# Altium footprint library Connector Header 254 Right Angel.PcbLib: 49 footprints (part 3 of 4)
Each footprint in its own frame and in the unit in brackets; x right, y up, seen from the top. Pads: shape width x height; smd on the part's side, far side on the other; paste and mask are expansions set on the pad; w line width, h text height; cw(c..) or ccw(c..) is an arc to the next point about the centre after c.
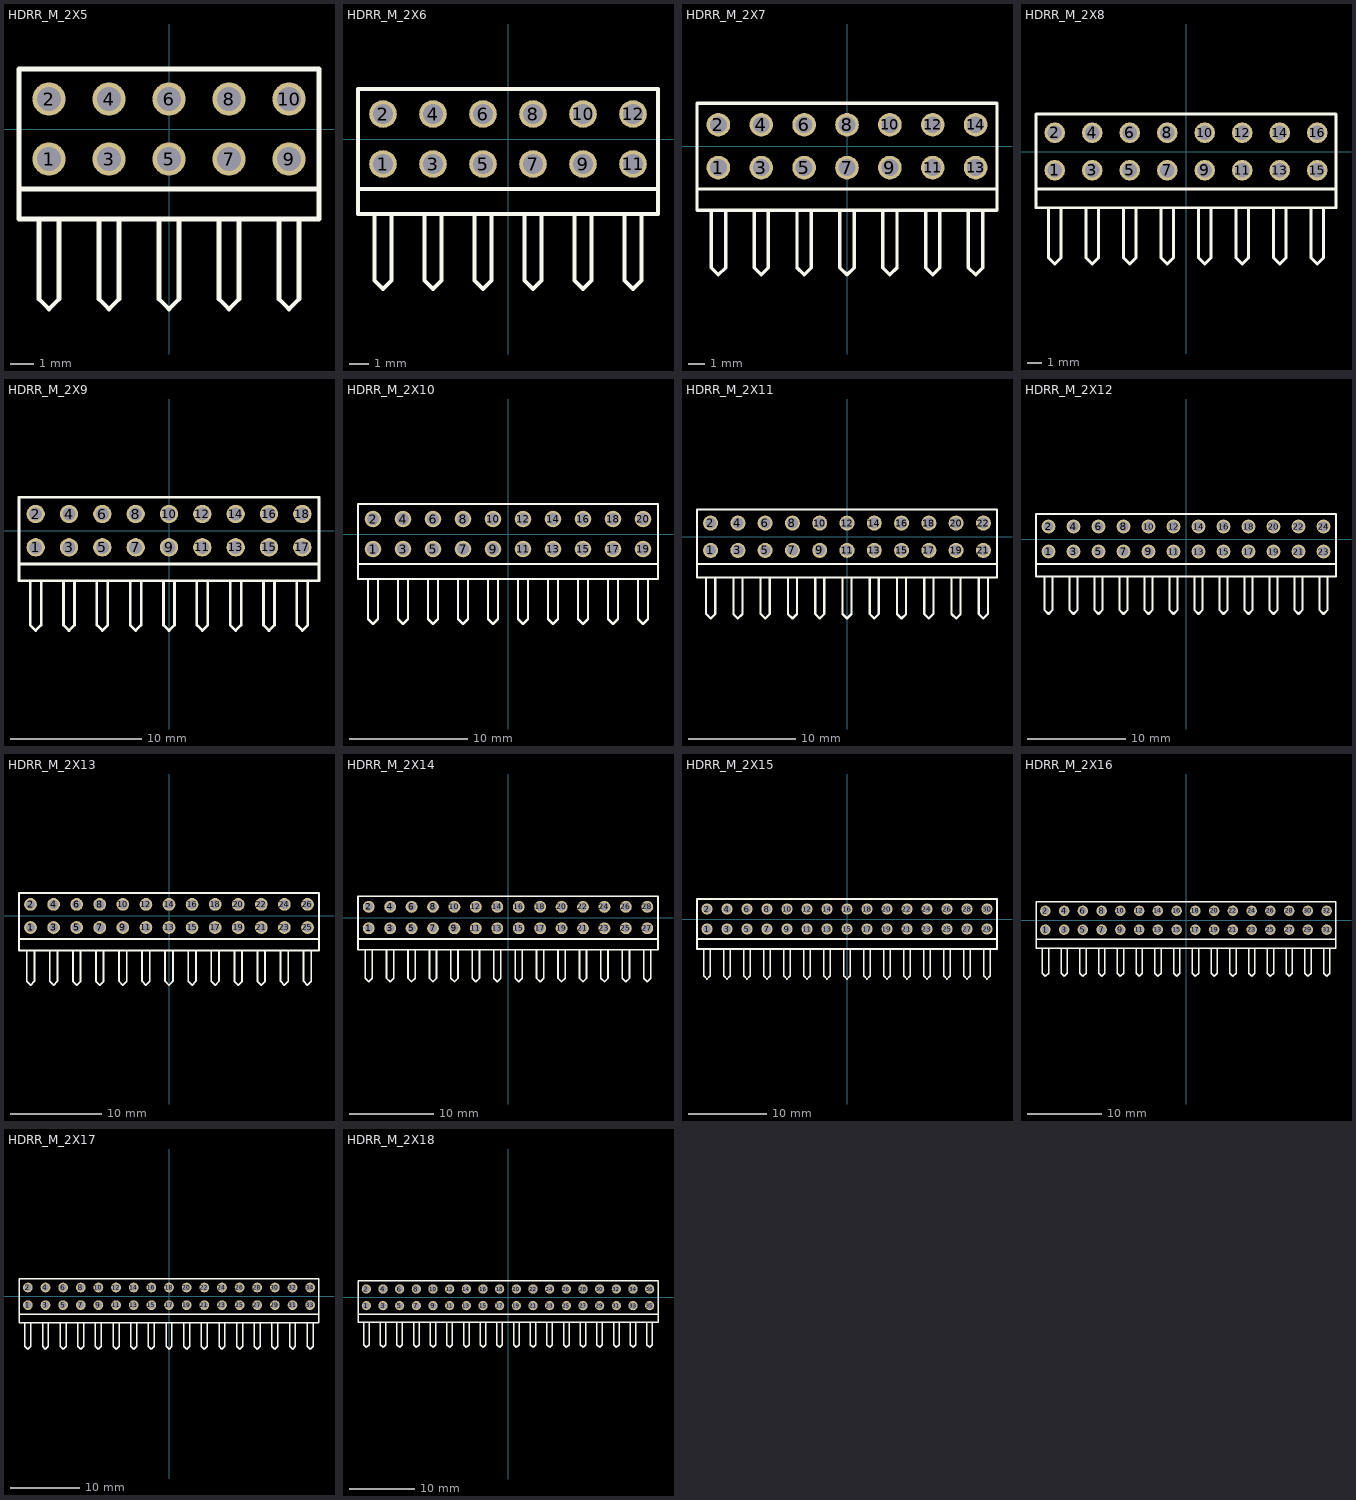
[diagram p2: the footprints below, top view; thin cyan lines are the x and y axes]

## HDRR_M_2X5 [mm] "Connector; Header; 5x2 Position"
height 7
pads (10):
  round 1.4 / inner round 1.4 / far side oval 1.4x2.2 hole 1: 1(-5.08,-1.27) 2(-5.08,1.27) 3(-2.54,-1.27) 4(-2.54,1.27) 5(0,-1.27) 6(0,1.27) 7(2.54,-1.27) 8(2.54,1.27) 9(5.08,-1.27) 10(5.08,1.27)
Top Overlay:
  lines w0.2: -5.503,-3.81 -5.503,-7.197 -5.08,-7.62 -4.657,-7.197 -4.657,-3.81 ; -2.963,-3.81 -2.963,-7.197 -2.54,-7.62 -2.117,-7.197 -2.117,-3.81 ; -0.423,-3.81 -0.423,-7.197 0,-7.62 0.423,-7.197 0.423,-3.81 ; 2.117,-3.81 2.117,-7.197 2.54,-7.62 2.963,-7.197 2.963,-3.81 ; 4.657,-3.81 4.657,-7.197 5.08,-7.62 5.503,-7.197 5.503,-3.81 ; -6.35,-2.54 -6.35,-3.81 6.35,-3.81 6.35,-2.54 ; -6.35,-2.54 6.35,-2.54 ; -6.35,-2.54 -6.35,2.54 6.35,2.54 6.35,-2.54
3D body "PLS-1R.step": height 5.45, standoff -3, extent -1.27,-8.62 1.27,0
3D body "PLS-1Rr.stp": height 7.99, standoff -3, extent -1.27,-8.62 1.27,2.54
3D body "PLS-1Rr.stp": height 7.99, standoff -3, extent -3.81,-8.62 -1.27,2.54
3D body "PLS-1R.step": height 5.45, standoff -3, extent -3.81,-8.62 -1.27,0
3D body "PLS-1R.step": height 5.45, standoff -3, extent 3.81,-8.62 6.35,0
3D body "PLS-1Rr.stp": height 7.99, standoff -3, extent 3.81,-8.62 6.35,2.54
3D body "PLS-1Rr.stp": height 7.99, standoff -3, extent 1.27,-8.62 3.81,2.54
3D body "PLS-1R.step": height 5.45, standoff -3, extent 1.27,-8.62 3.81,0
3D body "PLS-1R.step": height 5.45, standoff -3, extent -6.35,-8.62 -3.81,0
3D body "PLS-1Rr.stp": height 7.99, standoff -3, extent -6.35,-8.62 -3.81,2.54

## HDRR_M_2X6 [mm] "Connector; Header; 6x2 Position"
height 7
pads (12):
  round 1.4 / inner round 1.4 / far side oval 1.4x2.2 hole 1: 1(-6.35,-1.27) 2(-6.35,1.27) 3(-3.81,-1.27) 4(-3.81,1.27) 5(-1.27,-1.27) 6(-1.27,1.27) 7(1.27,-1.27) 8(1.27,1.27) 9(3.81,-1.27) 10(3.81,1.27) 11(6.35,-1.27) 12(6.35,1.27)
Top Overlay:
  lines w0.2: -6.773,-3.81 -6.773,-7.197 -6.35,-7.62 -5.927,-7.197 -5.927,-3.81 ; -4.233,-3.81 -4.233,-7.197 -3.81,-7.62 -3.387,-7.197 -3.387,-3.81 ; -1.693,-3.81 -1.693,-7.197 -1.27,-7.62 -0.847,-7.197 -0.847,-3.81 ; 0.847,-3.81 0.847,-7.197 1.27,-7.62 1.693,-7.197 1.693,-3.81 ; 3.387,-3.81 3.387,-7.197 3.81,-7.62 4.233,-7.197 4.233,-3.81 ; 5.927,-3.81 5.927,-7.197 6.35,-7.62 6.773,-7.197 6.773,-3.81 ; -7.62,-2.54 -7.62,2.54 7.62,2.54 7.62,-2.54 ; -7.62,-2.54 7.62,-2.54 ; -7.62,-2.54 -7.62,-3.81 7.62,-3.81 7.62,-2.54
3D body "PLS-1R.step": height 5.45, standoff -3, extent -5.08,-8.62 -2.54,0
3D body "PLS-1Rr.stp": height 7.99, standoff -3, extent -5.08,-8.62 -2.54,2.54
3D body "PLS-1Rr.stp": height 7.99, standoff -3, extent -7.62,-8.62 -5.08,2.54
3D body "PLS-1R.step": height 5.45, standoff -3, extent -7.62,-8.62 -5.08,0
3D body "PLS-1R.step": height 5.45, standoff -3, extent 0,-8.62 2.54,0
3D body "PLS-1Rr.stp": height 7.99, standoff -3, extent 0,-8.62 2.54,2.54
3D body "PLS-1Rr.stp": height 7.99, standoff -3, extent -2.54,-8.62 0,2.54
3D body "PLS-1R.step": height 5.45, standoff -3, extent -2.54,-8.62 0,0
3D body "PLS-1R.step": height 5.45, standoff -3, extent 5.08,-8.62 7.62,0
3D body "PLS-1Rr.stp": height 7.99, standoff -3, extent 5.08,-8.62 7.62,2.54
3D body "PLS-1Rr.stp": height 7.99, standoff -3, extent 2.54,-8.62 5.08,2.54
3D body "PLS-1R.step": height 5.45, standoff -3, extent 2.54,-8.62 5.08,0

## HDRR_M_2X7 [mm] "Connector; Header; 7x2 Position"
height 7
pads (14):
  round 1.4 / inner round 1.4 / far side oval 1.4x2.2 hole 1: 1(-7.62,-1.27) 2(-7.62,1.27) 3(-5.08,-1.27) 4(-5.08,1.27) 5(-2.54,-1.27) 6(-2.54,1.27) 7(0,-1.27) 8(0,1.27) 9(2.54,-1.27) 10(2.54,1.27) 11(5.08,-1.27) 12(5.08,1.27) 13(7.62,-1.27) 14(7.62,1.27)
Top Overlay:
  lines w0.2: -8.043,-3.81 -8.043,-7.197 -7.62,-7.62 -7.197,-7.197 -7.197,-3.81 ; -5.503,-3.81 -5.503,-7.197 -5.08,-7.62 -4.657,-7.197 -4.657,-3.81 ; -2.963,-3.81 -2.963,-7.197 -2.54,-7.62 -2.117,-7.197 -2.117,-3.81 ; -0.423,-3.81 -0.423,-7.197 0,-7.62 0.423,-7.197 0.423,-3.81 ; 2.117,-3.81 2.117,-7.197 2.54,-7.62 2.963,-7.197 2.963,-3.81 ; 4.657,-3.81 4.657,-7.197 5.08,-7.62 5.503,-7.197 5.503,-3.81 ; 7.197,-3.81 7.197,-7.197 7.62,-7.62 8.043,-7.197 8.043,-3.81 ; -8.89,-2.54 8.89,-2.54 ; -8.89,-2.54 -8.89,2.54 8.89,2.54 8.89,-2.54 ; -8.89,-2.54 -8.89,-3.81 8.89,-3.81 8.89,-2.54
3D body "PLS-1R.step": height 5.45, standoff -3, extent 3.81,-8.62 6.35,0
3D body "PLS-1Rr.stp": height 7.99, standoff -3, extent 3.81,-8.62 6.35,2.54
3D body "PLS-1Rr.stp": height 7.99, standoff -3, extent 1.27,-8.62 3.81,2.54
3D body "PLS-1R.step": height 5.45, standoff -3, extent 1.27,-8.62 3.81,0
3D body "PLS-1R.step": height 5.45, standoff -3, extent -1.27,-8.62 1.27,0
3D body "PLS-1Rr.stp": height 7.99, standoff -3, extent -1.27,-8.62 1.27,2.54
3D body "PLS-1Rr.stp": height 7.99, standoff -3, extent -3.81,-8.62 -1.27,2.54
3D body "PLS-1R.step": height 5.45, standoff -3, extent -3.81,-8.62 -1.27,0
3D body "PLS-1R.step": height 5.45, standoff -3, extent -6.35,-8.62 -3.81,0
3D body "PLS-1Rr.stp": height 7.99, standoff -3, extent -6.35,-8.62 -3.81,2.54
3D body "PLS-1Rr.stp": height 7.99, standoff -3, extent -8.89,-8.62 -6.35,2.54
3D body "PLS-1R.step": height 5.45, standoff -3, extent -8.89,-8.62 -6.35,0
3D body "PLS-1R.step": height 5.45, standoff -3, extent 6.35,-8.62 8.89,0
3D body "PLS-1Rr.stp": height 7.99, standoff -3, extent 6.35,-8.62 8.89,2.54

## HDRR_M_2X8 [mm] "Connector; Header; 8x2 Position"
height 7
pads (16):
  round 1.4 / inner round 1.4 / far side oval 1.4x2.2 hole 1: 1(-8.89,-1.27) 2(-8.89,1.27) 3(-6.35,-1.27) 4(-6.35,1.27) 5(-3.81,-1.27) 6(-3.81,1.27) 7(-1.27,-1.27) 8(-1.27,1.27) 9(1.27,-1.27) 10(1.27,1.27) 11(3.81,-1.27) 12(3.81,1.27) 13(6.35,-1.27) 14(6.35,1.27) 15(8.89,-1.27) 16(8.89,1.27)
Top Overlay:
  lines w0.2: -9.313,-3.81 -9.313,-7.197 -8.89,-7.62 -8.467,-7.197 -8.467,-3.81 ; -6.773,-3.81 -6.773,-7.197 -6.35,-7.62 -5.927,-7.197 -5.927,-3.81 ; -4.233,-3.81 -4.233,-7.197 -3.81,-7.62 -3.387,-7.197 -3.387,-3.81 ; -1.693,-3.81 -1.693,-7.197 -1.27,-7.62 -0.847,-7.197 -0.847,-3.81 ; 0.847,-3.81 0.847,-7.197 1.27,-7.62 1.693,-7.197 1.693,-3.81 ; 3.387,-3.81 3.387,-7.197 3.81,-7.62 4.233,-7.197 4.233,-3.81 ; 5.927,-3.81 5.927,-7.197 6.35,-7.62 6.773,-7.197 6.773,-3.81 ; 8.467,-3.81 8.467,-7.197 8.89,-7.62 9.313,-7.197 9.313,-3.81 ; -10.16,-2.54 -10.16,-3.81 10.16,-3.81 10.16,-2.54 ; -10.16,-2.54 -10.16,2.54 10.16,2.54 10.16,-2.54 ; -10.16,-2.54 10.16,-2.54
3D body "PLS-1R.step": height 5.45, standoff -3, extent -10.16,-8.62 -7.62,0
3D body "PLS-1Rr.stp": height 7.99, standoff -3, extent -10.16,-8.62 -7.62,2.54
3D body "PLS-1Rr.stp": height 7.99, standoff -3, extent -7.62,-8.62 -5.08,2.54
3D body "PLS-1R.step": height 5.45, standoff -3, extent -7.62,-8.62 -5.08,0
3D body "PLS-1R.step": height 5.45, standoff -3, extent -5.08,-8.62 -2.54,0
3D body "PLS-1Rr.stp": height 7.99, standoff -3, extent -5.08,-8.62 -2.54,2.54
3D body "PLS-1Rr.stp": height 7.99, standoff -3, extent -2.54,-8.62 0,2.54
3D body "PLS-1R.step": height 5.45, standoff -3, extent -2.54,-8.62 0,0
3D body "PLS-1R.step": height 5.45, standoff -3, extent 0,-8.62 2.54,0
3D body "PLS-1Rr.stp": height 7.99, standoff -3, extent 0,-8.62 2.54,2.54
3D body "PLS-1Rr.stp": height 7.99, standoff -3, extent 2.54,-8.62 5.08,2.54
3D body "PLS-1R.step": height 5.45, standoff -3, extent 2.54,-8.62 5.08,0
3D body "PLS-1R.step": height 5.45, standoff -3, extent 5.08,-8.62 7.62,0
3D body "PLS-1Rr.stp": height 7.99, standoff -3, extent 5.08,-8.62 7.62,2.54
3D body "PLS-1Rr.stp": height 7.99, standoff -3, extent 7.62,-8.62 10.16,2.54
3D body "PLS-1R.step": height 5.45, standoff -3, extent 7.62,-8.62 10.16,0

## HDRR_M_2X9 [mm] "Connector; Header; 9x2 Position"
height 7
pads (18):
  round 1.4 / inner round 1.4 / far side oval 1.4x2.2 hole 1: 1(-10.16,-1.27) 2(-10.16,1.27) 3(-7.62,-1.27) 4(-7.62,1.27) 5(-5.08,-1.27) 6(-5.08,1.27) 7(-2.54,-1.27) 8(-2.54,1.27) 9(0,-1.27) 10(0,1.27) 11(2.54,-1.27) 12(2.54,1.27) 13(5.08,-1.27) 14(5.08,1.27) 15(7.62,-1.27) 16(7.62,1.27) 17(10.16,-1.27) 18(10.16,1.27)
Top Overlay:
  lines w0.2: -10.583,-3.81 -10.583,-7.197 -10.16,-7.62 -9.737,-7.197 -9.737,-3.81 ; -8.043,-3.81 -8.043,-7.197 -7.62,-7.62 -7.197,-7.197 -7.197,-3.81 ; -5.503,-3.81 -5.503,-7.197 -5.08,-7.62 -4.657,-7.197 -4.657,-3.81 ; -2.963,-3.81 -2.963,-7.197 -2.54,-7.62 -2.117,-7.197 -2.117,-3.81 ; -0.423,-3.81 -0.423,-7.197 0,-7.62 0.423,-7.197 0.423,-3.81 ; 2.117,-3.81 2.117,-7.197 2.54,-7.62 2.963,-7.197 2.963,-3.81 ; 4.657,-3.81 4.657,-7.197 5.08,-7.62 5.503,-7.197 5.503,-3.81 ; 7.197,-3.81 7.197,-7.197 7.62,-7.62 8.043,-7.197 8.043,-3.81 ; 9.737,-3.81 9.737,-7.197 10.16,-7.62 10.583,-7.197 10.583,-3.81 ; -11.43,-2.54 -11.43,-3.81 11.43,-3.81 11.43,-2.54 ; -11.43,-2.54 11.43,-2.54 ; -11.43,-2.54 -11.43,2.54 11.43,2.54 11.43,-2.54
3D body "PLS-1R.step": height 5.45, standoff -3, extent 6.35,-8.62 8.89,0
3D body "PLS-1Rr.stp": height 7.99, standoff -3, extent 6.35,-8.62 8.89,2.54
3D body "PLS-1Rr.stp": height 7.99, standoff -3, extent 3.81,-8.62 6.35,2.54
3D body "PLS-1R.step": height 5.45, standoff -3, extent 3.81,-8.62 6.35,0
3D body "PLS-1R.step": height 5.45, standoff -3, extent 1.27,-8.62 3.81,0
3D body "PLS-1Rr.stp": height 7.99, standoff -3, extent 1.27,-8.62 3.81,2.54
3D body "PLS-1Rr.stp": height 7.99, standoff -3, extent -1.27,-8.62 1.27,2.54
3D body "PLS-1R.step": height 5.45, standoff -3, extent -1.27,-8.62 1.27,0
3D body "PLS-1R.step": height 5.45, standoff -3, extent -3.81,-8.62 -1.27,0
3D body "PLS-1Rr.stp": height 7.99, standoff -3, extent -3.81,-8.62 -1.27,2.54
3D body "PLS-1Rr.stp": height 7.99, standoff -3, extent -6.35,-8.62 -3.81,2.54
3D body "PLS-1R.step": height 5.45, standoff -3, extent -6.35,-8.62 -3.81,0
3D body "PLS-1R.step": height 5.45, standoff -3, extent -8.89,-8.62 -6.35,0
3D body "PLS-1Rr.stp": height 7.99, standoff -3, extent -8.89,-8.62 -6.35,2.54
3D body "PLS-1Rr.stp": height 7.99, standoff -3, extent -11.43,-8.62 -8.89,2.54
3D body "PLS-1R.step": height 5.45, standoff -3, extent -11.43,-8.62 -8.89,0
3D body "PLS-1R.step": height 5.45, standoff -3, extent 8.89,-8.62 11.43,0
3D body "PLS-1Rr.stp": height 7.99, standoff -3, extent 8.89,-8.62 11.43,2.54

## HDRR_M_2X10 [mm] "Connector; Header; 10x2 Position"
height 7
pads (20):
  round 1.4 / inner round 1.4 / far side oval 1.4x2.2 hole 1: 1(-11.43,-1.27) 2(-11.43,1.27) 3(-8.89,-1.27) 4(-8.89,1.27) 5(-6.35,-1.27) 6(-6.35,1.27) 7(-3.81,-1.27) 8(-3.81,1.27) 9(-1.27,-1.27) 10(-1.27,1.27) 11(1.27,-1.27) 12(1.27,1.27) 13(3.81,-1.27) 14(3.81,1.27) 15(6.35,-1.27) 16(6.35,1.27) 17(8.89,-1.27) 18(8.89,1.27) 19(11.43,-1.27) 20(11.43,1.27)
Top Overlay:
  lines w0.2: -11.853,-3.81 -11.853,-7.197 -11.43,-7.62 -11.007,-7.197 -11.007,-3.81 ; -9.313,-3.81 -9.313,-7.197 -8.89,-7.62 -8.467,-7.197 -8.467,-3.81 ; -6.773,-3.81 -6.773,-7.197 -6.35,-7.62 -5.927,-7.197 -5.927,-3.81 ; -4.233,-3.81 -4.233,-7.197 -3.81,-7.62 -3.387,-7.197 -3.387,-3.81 ; -1.693,-3.81 -1.693,-7.197 -1.27,-7.62 -0.847,-7.197 -0.847,-3.81 ; 0.847,-3.81 0.847,-7.197 1.27,-7.62 1.693,-7.197 1.693,-3.81 ; 3.387,-3.81 3.387,-7.197 3.81,-7.62 4.233,-7.197 4.233,-3.81 ; 5.927,-3.81 5.927,-7.197 6.35,-7.62 6.773,-7.197 6.773,-3.81 ; 8.467,-3.81 8.467,-7.197 8.89,-7.62 9.313,-7.197 9.313,-3.81 ; 11.007,-3.81 11.007,-7.197 11.43,-7.62 11.853,-7.197 11.853,-3.81 ; -12.7,-2.54 -12.7,-3.81 12.7,-3.81 12.7,-2.54 ; -12.7,-2.54 12.7,-2.54 ; -12.7,-2.54 -12.7,2.54 12.7,2.54 12.7,-2.54
3D body "PLS-1R.step": height 5.45, standoff -3, extent -12.7,-8.62 -10.16,0
3D body "PLS-1Rr.stp": height 7.99, standoff -3, extent -12.7,-8.62 -10.16,2.54
3D body "PLS-1Rr.stp": height 7.99, standoff -3, extent -10.16,-8.62 -7.62,2.54
3D body "PLS-1R.step": height 5.45, standoff -3, extent -10.16,-8.62 -7.62,0
3D body "PLS-1R.step": height 5.45, standoff -3, extent -7.62,-8.62 -5.08,0
3D body "PLS-1Rr.stp": height 7.99, standoff -3, extent -7.62,-8.62 -5.08,2.54
3D body "PLS-1Rr.stp": height 7.99, standoff -3, extent -5.08,-8.62 -2.54,2.54
3D body "PLS-1R.step": height 5.45, standoff -3, extent -5.08,-8.62 -2.54,0
3D body "PLS-1R.step": height 5.45, standoff -3, extent -2.54,-8.62 0,0
3D body "PLS-1Rr.stp": height 7.99, standoff -3, extent -2.54,-8.62 0,2.54
3D body "PLS-1Rr.stp": height 7.99, standoff -3, extent 0,-8.62 2.54,2.54
3D body "PLS-1R.step": height 5.45, standoff -3, extent 0,-8.62 2.54,0
3D body "PLS-1R.step": height 5.45, standoff -3, extent 2.54,-8.62 5.08,0
3D body "PLS-1Rr.stp": height 7.99, standoff -3, extent 2.54,-8.62 5.08,2.54
3D body "PLS-1Rr.stp": height 7.99, standoff -3, extent 5.08,-8.62 7.62,2.54
3D body "PLS-1R.step": height 5.45, standoff -3, extent 5.08,-8.62 7.62,0
3D body "PLS-1R.step": height 5.45, standoff -3, extent 7.62,-8.62 10.16,0
3D body "PLS-1Rr.stp": height 7.99, standoff -3, extent 7.62,-8.62 10.16,2.54
3D body "PLS-1Rr.stp": height 7.99, standoff -3, extent 10.16,-8.62 12.7,2.54
3D body "PLS-1R.step": height 5.45, standoff -3, extent 10.16,-8.62 12.7,0

## HDRR_M_2X11 [mm] "Connector; Header; 11x2 Position"
height 7
pads (22):
  round 1.4 / inner round 1.4 / far side oval 1.4x2.2 hole 1: 1(-12.7,-1.27) 2(-12.7,1.27) 3(-10.16,-1.27) 4(-10.16,1.27) 5(-7.62,-1.27) 6(-7.62,1.27) 7(-5.08,-1.27) 8(-5.08,1.27) 9(-2.54,-1.27) 10(-2.54,1.27) 11(0,-1.27) 12(0,1.27) 13(2.54,-1.27) 14(2.54,1.27) 15(5.08,-1.27) 16(5.08,1.27) 17(7.62,-1.27) 18(7.62,1.27) 19(10.16,-1.27) 20(10.16,1.27) 21(12.7,-1.27) 22(12.7,1.27)
Top Overlay:
  lines w0.2: -13.123,-3.81 -13.123,-7.197 -12.7,-7.62 -12.277,-7.197 -12.277,-3.81 ; -10.583,-3.81 -10.583,-7.197 -10.16,-7.62 -9.737,-7.197 -9.737,-3.81 ; -8.043,-3.81 -8.043,-7.197 -7.62,-7.62 -7.197,-7.197 -7.197,-3.81 ; -5.503,-3.81 -5.503,-7.197 -5.08,-7.62 -4.657,-7.197 -4.657,-3.81 ; -2.963,-3.81 -2.963,-7.197 -2.54,-7.62 -2.117,-7.197 -2.117,-3.81 ; -0.423,-3.81 -0.423,-7.197 0,-7.62 0.423,-7.197 0.423,-3.81 ; 2.117,-3.81 2.117,-7.197 2.54,-7.62 2.963,-7.197 2.963,-3.81 ; 4.657,-3.81 4.657,-7.197 5.08,-7.62 5.503,-7.197 5.503,-3.81 ; 7.197,-3.81 7.197,-7.197 7.62,-7.62 8.043,-7.197 8.043,-3.81 ; 9.737,-3.81 9.737,-7.197 10.16,-7.62 10.583,-7.197 10.583,-3.81 ; 12.277,-3.81 12.277,-7.197 12.7,-7.62 13.123,-7.197 13.123,-3.81 ; -13.97,-2.54 13.97,-2.54 ; -13.97,-2.54 -13.97,2.54 13.97,2.54 13.97,-2.54 ; -13.97,-2.54 -13.97,-3.81 13.97,-3.81 13.97,-2.54
3D body "PLS-1Rr.stp": height 7.99, standoff -3, extent 11.43,-8.62 13.97,2.54
3D body "PLS-1R.step": height 5.45, standoff -3, extent 11.43,-8.62 13.97,0
3D body "PLS-1R.step": height 5.45, standoff -3, extent -13.97,-8.62 -11.43,0
3D body "PLS-1Rr.stp": height 7.99, standoff -3, extent -13.97,-8.62 -11.43,2.54
3D body "PLS-1Rr.stp": height 7.99, standoff -3, extent -11.43,-8.62 -8.89,2.54
3D body "PLS-1R.step": height 5.45, standoff -3, extent -11.43,-8.62 -8.89,0
3D body "PLS-1R.step": height 5.45, standoff -3, extent -8.89,-8.62 -6.35,0
3D body "PLS-1Rr.stp": height 7.99, standoff -3, extent -8.89,-8.62 -6.35,2.54
3D body "PLS-1Rr.stp": height 7.99, standoff -3, extent -6.35,-8.62 -3.81,2.54
3D body "PLS-1R.step": height 5.45, standoff -3, extent -6.35,-8.62 -3.81,0
3D body "PLS-1R.step": height 5.45, standoff -3, extent -3.81,-8.62 -1.27,0
3D body "PLS-1Rr.stp": height 7.99, standoff -3, extent -3.81,-8.62 -1.27,2.54
3D body "PLS-1Rr.stp": height 7.99, standoff -3, extent -1.27,-8.62 1.27,2.54
3D body "PLS-1R.step": height 5.45, standoff -3, extent -1.27,-8.62 1.27,0
3D body "PLS-1R.step": height 5.45, standoff -3, extent 1.27,-8.62 3.81,0
3D body "PLS-1Rr.stp": height 7.99, standoff -3, extent 1.27,-8.62 3.81,2.54
3D body "PLS-1Rr.stp": height 7.99, standoff -3, extent 3.81,-8.62 6.35,2.54
3D body "PLS-1R.step": height 5.45, standoff -3, extent 3.81,-8.62 6.35,0
3D body "PLS-1R.step": height 5.45, standoff -3, extent 6.35,-8.62 8.89,0
3D body "PLS-1Rr.stp": height 7.99, standoff -3, extent 6.35,-8.62 8.89,2.54
3D body "PLS-1Rr.stp": height 7.99, standoff -3, extent 8.89,-8.62 11.43,2.54
3D body "PLS-1R.step": height 5.45, standoff -3, extent 8.89,-8.62 11.43,0

## HDRR_M_2X12 [mm] "Connector; Header; 12x2 Position"
height 7
pads (24):
  round 1.4 / inner round 1.4 / far side oval 1.4x2.2 hole 1: 1(-13.97,-1.27) 2(-13.97,1.27) 3(-11.43,-1.27) 4(-11.43,1.27) 5(-8.89,-1.27) 6(-8.89,1.27) 7(-6.35,-1.27) 8(-6.35,1.27) 9(-3.81,-1.27) 10(-3.81,1.27) 11(-1.27,-1.27) 12(-1.27,1.27) 13(1.27,-1.27) 14(1.27,1.27) 15(3.81,-1.27) 16(3.81,1.27) 17(6.35,-1.27) 18(6.35,1.27) 19(8.89,-1.27) 20(8.89,1.27) 21(11.43,-1.27) 22(11.43,1.27) 23(13.97,-1.27) 24(13.97,1.27)
Top Overlay:
  lines w0.2: -14.393,-3.81 -14.393,-7.197 -13.97,-7.62 -13.547,-7.197 -13.547,-3.81 ; -11.853,-3.81 -11.853,-7.197 -11.43,-7.62 -11.007,-7.197 -11.007,-3.81 ; -9.313,-3.81 -9.313,-7.197 -8.89,-7.62 -8.467,-7.197 -8.467,-3.81 ; -6.773,-3.81 -6.773,-7.197 -6.35,-7.62 -5.927,-7.197 -5.927,-3.81 ; -4.233,-3.81 -4.233,-7.197 -3.81,-7.62 -3.387,-7.197 -3.387,-3.81 ; -1.693,-3.81 -1.693,-7.197 -1.27,-7.62 -0.847,-7.197 -0.847,-3.81 ; 0.847,-3.81 0.847,-7.197 1.27,-7.62 1.693,-7.197 1.693,-3.81 ; 3.387,-3.81 3.387,-7.197 3.81,-7.62 4.233,-7.197 4.233,-3.81 ; 5.927,-3.81 5.927,-7.197 6.35,-7.62 6.773,-7.197 6.773,-3.81 ; 8.467,-3.81 8.467,-7.197 8.89,-7.62 9.313,-7.197 9.313,-3.81 ; 11.007,-3.81 11.007,-7.197 11.43,-7.62 11.853,-7.197 11.853,-3.81 ; 13.547,-3.81 13.547,-7.197 13.97,-7.62 14.393,-7.197 14.393,-3.81 ; -15.24,-2.54 -15.24,-3.81 15.24,-3.81 15.24,-2.54 ; -15.24,-2.54 -15.24,2.54 15.24,2.54 15.24,-2.54 ; -15.24,-2.54 15.24,-2.54
3D body "PLS-1R.step": height 5.45, standoff -3, extent 12.7,-8.62 15.24,0
3D body "PLS-1Rr.stp": height 7.99, standoff -3, extent 12.7,-8.62 15.24,2.54
3D body "PLS-1Rr.stp": height 7.99, standoff -3, extent 10.16,-8.62 12.7,2.54
3D body "PLS-1R.step": height 5.45, standoff -3, extent 10.16,-8.62 12.7,0
3D body "PLS-1R.step": height 5.45, standoff -3, extent 7.62,-8.62 10.16,0
3D body "PLS-1Rr.stp": height 7.99, standoff -3, extent 7.62,-8.62 10.16,2.54
3D body "PLS-1Rr.stp": height 7.99, standoff -3, extent 5.08,-8.62 7.62,2.54
3D body "PLS-1R.step": height 5.45, standoff -3, extent 5.08,-8.62 7.62,0
3D body "PLS-1R.step": height 5.45, standoff -3, extent 2.54,-8.62 5.08,0
3D body "PLS-1Rr.stp": height 7.99, standoff -3, extent 2.54,-8.62 5.08,2.54
3D body "PLS-1Rr.stp": height 7.99, standoff -3, extent 0,-8.62 2.54,2.54
3D body "PLS-1R.step": height 5.45, standoff -3, extent 0,-8.62 2.54,0
3D body "PLS-1R.step": height 5.45, standoff -3, extent -2.54,-8.62 0,0
3D body "PLS-1Rr.stp": height 7.99, standoff -3, extent -2.54,-8.62 0,2.54
3D body "PLS-1Rr.stp": height 7.99, standoff -3, extent -5.08,-8.62 -2.54,2.54
3D body "PLS-1R.step": height 5.45, standoff -3, extent -5.08,-8.62 -2.54,0
3D body "PLS-1R.step": height 5.45, standoff -3, extent -7.62,-8.62 -5.08,0
3D body "PLS-1Rr.stp": height 7.99, standoff -3, extent -7.62,-8.62 -5.08,2.54
3D body "PLS-1Rr.stp": height 7.99, standoff -3, extent -10.16,-8.62 -7.62,2.54
3D body "PLS-1R.step": height 5.45, standoff -3, extent -10.16,-8.62 -7.62,0
3D body "PLS-1R.step": height 5.45, standoff -3, extent -12.7,-8.62 -10.16,0
3D body "PLS-1Rr.stp": height 7.99, standoff -3, extent -12.7,-8.62 -10.16,2.54
3D body "PLS-1Rr.stp": height 7.99, standoff -3, extent -15.24,-8.62 -12.7,2.54
3D body "PLS-1R.step": height 5.45, standoff -3, extent -15.24,-8.62 -12.7,0

## HDRR_M_2X13 [mm] "Connector; Header; 13x2 Position"
height 7
pads (26):
  round 1.4 / inner round 1.4 / far side oval 1.4x2.2 hole 1: 1(-15.24,-1.27) 2(-15.24,1.27) 3(-12.7,-1.27) 4(-12.7,1.27) 5(-10.16,-1.27) 6(-10.16,1.27) 7(-7.62,-1.27) 8(-7.62,1.27) 9(-5.08,-1.27) 10(-5.08,1.27) 11(-2.54,-1.27) 12(-2.54,1.27) 13(0,-1.27) 14(0,1.27) 15(2.54,-1.27) 16(2.54,1.27) 17(5.08,-1.27) 18(5.08,1.27) 19(7.62,-1.27) 20(7.62,1.27) 21(10.16,-1.27) 22(10.16,1.27) 23(12.7,-1.27) 24(12.7,1.27) 25(15.24,-1.27) 26(15.24,1.27)
Top Overlay:
  lines w0.2: -15.663,-3.81 -15.663,-7.197 -15.24,-7.62 -14.817,-7.197 -14.817,-3.81 ; -13.123,-3.81 -13.123,-7.197 -12.7,-7.62 -12.277,-7.197 -12.277,-3.81 ; -10.583,-3.81 -10.583,-7.197 -10.16,-7.62 -9.737,-7.197 -9.737,-3.81 ; -8.043,-3.81 -8.043,-7.197 -7.62,-7.62 -7.197,-7.197 -7.197,-3.81 ; -5.503,-3.81 -5.503,-7.197 -5.08,-7.62 -4.657,-7.197 -4.657,-3.81 ; -2.963,-3.81 -2.963,-7.197 -2.54,-7.62 -2.117,-7.197 -2.117,-3.81 ; -0.423,-3.81 -0.423,-7.197 0,-7.62 0.423,-7.197 0.423,-3.81 ; 2.117,-3.81 2.117,-7.197 2.54,-7.62 2.963,-7.197 2.963,-3.81 ; 4.657,-3.81 4.657,-7.197 5.08,-7.62 5.503,-7.197 5.503,-3.81 ; 7.197,-3.81 7.197,-7.197 7.62,-7.62 8.043,-7.197 8.043,-3.81 ; 9.737,-3.81 9.737,-7.197 10.16,-7.62 10.583,-7.197 10.583,-3.81 ; 12.277,-3.81 12.277,-7.197 12.7,-7.62 13.123,-7.197 13.123,-3.81 ; 14.817,-3.81 14.817,-7.197 15.24,-7.62 15.663,-7.197 15.663,-3.81 ; -16.51,-2.54 -16.51,-3.81 16.51,-3.81 16.51,-2.54 ; -16.51,-2.54 -16.51,2.54 16.51,2.54 16.51,-2.54 ; -16.51,-2.54 16.51,-2.54
3D body "PLS-1R.step": height 5.45, standoff -3, extent 11.43,-8.62 13.97,0
3D body "PLS-1Rr.stp": height 7.99, standoff -3, extent 11.43,-8.62 13.97,2.54
3D body "PLS-1Rr.stp": height 7.99, standoff -3, extent 8.89,-8.62 11.43,2.54
3D body "PLS-1R.step": height 5.45, standoff -3, extent 8.89,-8.62 11.43,0
3D body "PLS-1R.step": height 5.45, standoff -3, extent 6.35,-8.62 8.89,0
3D body "PLS-1Rr.stp": height 7.99, standoff -3, extent 6.35,-8.62 8.89,2.54
3D body "PLS-1Rr.stp": height 7.99, standoff -3, extent 3.81,-8.62 6.35,2.54
3D body "PLS-1R.step": height 5.45, standoff -3, extent 3.81,-8.62 6.35,0
3D body "PLS-1R.step": height 5.45, standoff -3, extent 1.27,-8.62 3.81,0
3D body "PLS-1Rr.stp": height 7.99, standoff -3, extent 1.27,-8.62 3.81,2.54
3D body "PLS-1Rr.stp": height 7.99, standoff -3, extent -1.27,-8.62 1.27,2.54
3D body "PLS-1R.step": height 5.45, standoff -3, extent -1.27,-8.62 1.27,0
3D body "PLS-1R.step": height 5.45, standoff -3, extent -3.81,-8.62 -1.27,0
3D body "PLS-1Rr.stp": height 7.99, standoff -3, extent -3.81,-8.62 -1.27,2.54
3D body "PLS-1Rr.stp": height 7.99, standoff -3, extent -6.35,-8.62 -3.81,2.54
3D body "PLS-1R.step": height 5.45, standoff -3, extent -6.35,-8.62 -3.81,0
3D body "PLS-1R.step": height 5.45, standoff -3, extent -8.89,-8.62 -6.35,0
3D body "PLS-1Rr.stp": height 7.99, standoff -3, extent -8.89,-8.62 -6.35,2.54
3D body "PLS-1Rr.stp": height 7.99, standoff -3, extent -11.43,-8.62 -8.89,2.54
3D body "PLS-1R.step": height 5.45, standoff -3, extent -11.43,-8.62 -8.89,0
3D body "PLS-1R.step": height 5.45, standoff -3, extent -13.97,-8.62 -11.43,0
3D body "PLS-1Rr.stp": height 7.99, standoff -3, extent -13.97,-8.62 -11.43,2.54
3D body "PLS-1Rr.stp": height 7.99, standoff -3, extent -16.51,-8.62 -13.97,2.54
3D body "PLS-1R.step": height 5.45, standoff -3, extent -16.51,-8.62 -13.97,0
3D body "PLS-1R.step": height 5.45, standoff -3, extent 13.97,-8.62 16.51,0
3D body "PLS-1Rr.stp": height 7.99, standoff -3, extent 13.97,-8.62 16.51,2.54

## HDRR_M_2X14 [mm] "Connector; Header; 14x2 Position"
height 7
pads (28):
  round 1.4 / inner round 1.4 / far side oval 1.4x2.2 hole 1: 1(-16.51,-1.27) 2(-16.51,1.27) 3(-13.97,-1.27) 4(-13.97,1.27) 5(-11.43,-1.27) 6(-11.43,1.27) 7(-8.89,-1.27) 8(-8.89,1.27) 9(-6.35,-1.27) 10(-6.35,1.27) 11(-3.81,-1.27) 12(-3.81,1.27) 13(-1.27,-1.27) 14(-1.27,1.27) 15(1.27,-1.27) 16(1.27,1.27) 17(3.81,-1.27) 18(3.81,1.27) 19(6.35,-1.27) 20(6.35,1.27) 21(8.89,-1.27) 22(8.89,1.27) 23(11.43,-1.27) 24(11.43,1.27) 25(13.97,-1.27) 26(13.97,1.27) 27(16.51,-1.27) 28(16.51,1.27)
Top Overlay:
  lines w0.2: -16.933,-3.81 -16.933,-7.197 -16.51,-7.62 -16.087,-7.197 -16.087,-3.81 ; -14.393,-3.81 -14.393,-7.197 -13.97,-7.62 -13.547,-7.197 -13.547,-3.81 ; -11.853,-3.81 -11.853,-7.197 -11.43,-7.62 -11.007,-7.197 -11.007,-3.81 ; -9.313,-3.81 -9.313,-7.197 -8.89,-7.62 -8.467,-7.197 -8.467,-3.81 ; -6.773,-3.81 -6.773,-7.197 -6.35,-7.62 -5.927,-7.197 -5.927,-3.81 ; -4.233,-3.81 -4.233,-7.197 -3.81,-7.62 -3.387,-7.197 -3.387,-3.81 ; -1.693,-3.81 -1.693,-7.197 -1.27,-7.62 -0.847,-7.197 -0.847,-3.81 ; 0.847,-3.81 0.847,-7.197 1.27,-7.62 1.693,-7.197 1.693,-3.81 ; 3.387,-3.81 3.387,-7.197 3.81,-7.62 4.233,-7.197 4.233,-3.81 ; 5.927,-3.81 5.927,-7.197 6.35,-7.62 6.773,-7.197 6.773,-3.81 ; 8.467,-3.81 8.467,-7.197 8.89,-7.62 9.313,-7.197 9.313,-3.81 ; 11.007,-3.81 11.007,-7.197 11.43,-7.62 11.853,-7.197 11.853,-3.81 ; 13.547,-3.81 13.547,-7.197 13.97,-7.62 14.393,-7.197 14.393,-3.81 ; 16.087,-3.81 16.087,-7.197 16.51,-7.62 16.933,-7.197 16.933,-3.81 ; -17.78,-2.54 17.78,-2.54 ; -17.78,-2.54 -17.78,2.54 17.78,2.54 17.78,-2.54 ; -17.78,-2.54 -17.78,-3.81 17.78,-3.81 17.78,-2.54
3D body "PLS-1R.step": height 5.45, standoff -3, extent 15.24,-8.62 17.78,0
3D body "PLS-1Rr.stp": height 7.99, standoff -3, extent 15.24,-8.62 17.78,2.54
3D body "PLS-1Rr.stp": height 7.99, standoff -3, extent 12.7,-8.62 15.24,2.54
3D body "PLS-1R.step": height 5.45, standoff -3, extent 12.7,-8.62 15.24,0
3D body "PLS-1R.step": height 5.45, standoff -3, extent 10.16,-8.62 12.7,0
3D body "PLS-1Rr.stp": height 7.99, standoff -3, extent 10.16,-8.62 12.7,2.54
3D body "PLS-1Rr.stp": height 7.99, standoff -3, extent 7.62,-8.62 10.16,2.54
3D body "PLS-1R.step": height 5.45, standoff -3, extent 7.62,-8.62 10.16,0
3D body "PLS-1R.step": height 5.45, standoff -3, extent 5.08,-8.62 7.62,0
3D body "PLS-1Rr.stp": height 7.99, standoff -3, extent 5.08,-8.62 7.62,2.54
3D body "PLS-1Rr.stp": height 7.99, standoff -3, extent 2.54,-8.62 5.08,2.54
3D body "PLS-1R.step": height 5.45, standoff -3, extent 2.54,-8.62 5.08,0
3D body "PLS-1R.step": height 5.45, standoff -3, extent 0,-8.62 2.54,0
3D body "PLS-1Rr.stp": height 7.99, standoff -3, extent 0,-8.62 2.54,2.54
3D body "PLS-1Rr.stp": height 7.99, standoff -3, extent -2.54,-8.62 0,2.54
3D body "PLS-1R.step": height 5.45, standoff -3, extent -2.54,-8.62 0,0
3D body "PLS-1R.step": height 5.45, standoff -3, extent -5.08,-8.62 -2.54,0
3D body "PLS-1Rr.stp": height 7.99, standoff -3, extent -5.08,-8.62 -2.54,2.54
3D body "PLS-1Rr.stp": height 7.99, standoff -3, extent -7.62,-8.62 -5.08,2.54
3D body "PLS-1R.step": height 5.45, standoff -3, extent -7.62,-8.62 -5.08,0
3D body "PLS-1R.step": height 5.45, standoff -3, extent -10.16,-8.62 -7.62,0
3D body "PLS-1Rr.stp": height 7.99, standoff -3, extent -10.16,-8.62 -7.62,2.54
3D body "PLS-1Rr.stp": height 7.99, standoff -3, extent -12.7,-8.62 -10.16,2.54
3D body "PLS-1R.step": height 5.45, standoff -3, extent -12.7,-8.62 -10.16,0
3D body "PLS-1R.step": height 5.45, standoff -3, extent -15.24,-8.62 -12.7,0
3D body "PLS-1Rr.stp": height 7.99, standoff -3, extent -15.24,-8.62 -12.7,2.54
3D body "PLS-1Rr.stp": height 7.99, standoff -3, extent -17.78,-8.62 -15.24,2.54
3D body "PLS-1R.step": height 5.45, standoff -3, extent -17.78,-8.62 -15.24,0

## HDRR_M_2X15 [mm] "Connector; Header; 15x2 Position"
height 0.001
pads (30):
  round 1.4 / inner round 1.4 / far side oval 1.4x2.2 hole 1: 1(-17.78,-1.27) 2(-17.78,1.27) 3(-15.24,-1.27) 4(-15.24,1.27) 5(-12.7,-1.27) 6(-12.7,1.27) 7(-10.16,-1.27) 8(-10.16,1.27) 9(-7.62,-1.27) 10(-7.62,1.27) 11(-5.08,-1.27) 12(-5.08,1.27) 13(-2.54,-1.27) 14(-2.54,1.27) 15(0,-1.27) 16(0,1.27) 17(2.54,-1.27) 18(2.54,1.27) 19(5.08,-1.27) 20(5.08,1.27) 21(7.62,-1.27) 22(7.62,1.27) 23(10.16,-1.27) 24(10.16,1.27) 25(12.7,-1.27) 26(12.7,1.27) 27(15.24,-1.27) 28(15.24,1.27) 29(17.78,-1.27) 30(17.78,1.27)
Top Overlay:
  lines w0.2: -18.203,-3.81 -18.203,-7.197 -17.78,-7.62 -17.357,-7.197 -17.357,-3.81 ; -15.663,-3.81 -15.663,-7.197 -15.24,-7.62 -14.817,-7.197 -14.817,-3.81 ; -13.123,-3.81 -13.123,-7.197 -12.7,-7.62 -12.277,-7.197 -12.277,-3.81 ; -10.583,-3.81 -10.583,-7.197 -10.16,-7.62 -9.737,-7.197 -9.737,-3.81 ; -8.043,-3.81 -8.043,-7.197 -7.62,-7.62 -7.197,-7.197 -7.197,-3.81 ; -5.503,-3.81 -5.503,-7.197 -5.08,-7.62 -4.657,-7.197 -4.657,-3.81 ; -2.963,-3.81 -2.963,-7.197 -2.54,-7.62 -2.117,-7.197 -2.117,-3.81 ; -0.423,-3.81 -0.423,-7.197 0,-7.62 0.423,-7.197 0.423,-3.81 ; 2.117,-3.81 2.117,-7.197 2.54,-7.62 2.963,-7.197 2.963,-3.81 ; 4.657,-3.81 4.657,-7.197 5.08,-7.62 5.503,-7.197 5.503,-3.81 ; 7.197,-3.81 7.197,-7.197 7.62,-7.62 8.043,-7.197 8.043,-3.81 ; 9.737,-3.81 9.737,-7.197 10.16,-7.62 10.583,-7.197 10.583,-3.81 ; 12.277,-3.81 12.277,-7.197 12.7,-7.62 13.123,-7.197 13.123,-3.81 ; 14.817,-3.81 14.817,-7.197 15.24,-7.62 15.663,-7.197 15.663,-3.81 ; 17.357,-3.81 17.357,-7.197 17.78,-7.62 18.203,-7.197 18.203,-3.81 ; -19.05,-2.54 -19.05,-3.81 19.05,-3.81 19.05,-2.54 ; -19.05,-2.54 19.05,-2.54 ; -19.05,-2.54 -19.05,2.54 19.05,2.54 19.05,-2.54
3D body "PLS-1Rr.stp": height 7.99, standoff -3, extent 16.51,-8.62 19.05,2.54
3D body "PLS-1R.step": height 5.45, standoff -3, extent 16.51,-8.62 19.05,0
3D body "PLS-1R.step": height 5.45, standoff -3, extent -19.05,-8.62 -16.51,0
3D body "PLS-1Rr.stp": height 7.99, standoff -3, extent -19.05,-8.62 -16.51,2.54
3D body "PLS-1Rr.stp": height 7.99, standoff -3, extent -16.51,-8.62 -13.97,2.54
3D body "PLS-1R.step": height 5.45, standoff -3, extent -16.51,-8.62 -13.97,0
3D body "PLS-1R.step": height 5.45, standoff -3, extent -13.97,-8.62 -11.43,0
3D body "PLS-1Rr.stp": height 7.99, standoff -3, extent -13.97,-8.62 -11.43,2.54
3D body "PLS-1Rr.stp": height 7.99, standoff -3, extent -11.43,-8.62 -8.89,2.54
3D body "PLS-1R.step": height 5.45, standoff -3, extent -11.43,-8.62 -8.89,0
3D body "PLS-1R.step": height 5.45, standoff -3, extent -8.89,-8.62 -6.35,0
3D body "PLS-1Rr.stp": height 7.99, standoff -3, extent -8.89,-8.62 -6.35,2.54
3D body "PLS-1Rr.stp": height 7.99, standoff -3, extent -6.35,-8.62 -3.81,2.54
3D body "PLS-1R.step": height 5.45, standoff -3, extent -6.35,-8.62 -3.81,0
3D body "PLS-1R.step": height 5.45, standoff -3, extent -3.81,-8.62 -1.27,0
3D body "PLS-1Rr.stp": height 7.99, standoff -3, extent -3.81,-8.62 -1.27,2.54
3D body "PLS-1Rr.stp": height 7.99, standoff -3, extent -1.27,-8.62 1.27,2.54
3D body "PLS-1R.step": height 5.45, standoff -3, extent -1.27,-8.62 1.27,0
3D body "PLS-1R.step": height 5.45, standoff -3, extent 1.27,-8.62 3.81,0
3D body "PLS-1Rr.stp": height 7.99, standoff -3, extent 1.27,-8.62 3.81,2.54
3D body "PLS-1Rr.stp": height 7.99, standoff -3, extent 3.81,-8.62 6.35,2.54
3D body "PLS-1R.step": height 5.45, standoff -3, extent 3.81,-8.62 6.35,0
3D body "PLS-1R.step": height 5.45, standoff -3, extent 6.35,-8.62 8.89,0
3D body "PLS-1Rr.stp": height 7.99, standoff -3, extent 6.35,-8.62 8.89,2.54
3D body "PLS-1Rr.stp": height 7.99, standoff -3, extent 8.89,-8.62 11.43,2.54
3D body "PLS-1R.step": height 5.45, standoff -3, extent 8.89,-8.62 11.43,0
3D body "PLS-1R.step": height 5.45, standoff -3, extent 11.43,-8.62 13.97,0
3D body "PLS-1Rr.stp": height 7.99, standoff -3, extent 11.43,-8.62 13.97,2.54
3D body "PLS-1Rr.stp": height 7.99, standoff -3, extent 13.97,-8.62 16.51,2.54
3D body "PLS-1R.step": height 5.45, standoff -3, extent 13.97,-8.62 16.51,0

## HDRR_M_2X16 [mm] "Connector; Header; 16x2 Position"
height 7
pads (32):
  round 1.4 / inner round 1.4 / far side oval 1.4x2.2 hole 1: 1(-19.05,-1.27) 2(-19.05,1.27) 3(-16.51,-1.27) 4(-16.51,1.27) 5(-13.97,-1.27) 6(-13.97,1.27) 7(-11.43,-1.27) 8(-11.43,1.27) 9(-8.89,-1.27) 10(-8.89,1.27) 11(-6.35,-1.27) 12(-6.35,1.27) 13(-3.81,-1.27) 14(-3.81,1.27) 15(-1.27,-1.27) 16(-1.27,1.27) 17(1.27,-1.27) 18(1.27,1.27) 19(3.81,-1.27) 20(3.81,1.27) 21(6.35,-1.27) 22(6.35,1.27) 23(8.89,-1.27) 24(8.89,1.27) 25(11.43,-1.27) 26(11.43,1.27) 27(13.97,-1.27) 28(13.97,1.27) 29(16.51,-1.27) 30(16.51,1.27) 31(19.05,-1.27) 32(19.05,1.27)
Top Overlay:
  lines w0.2: -19.473,-3.81 -19.473,-7.197 -19.05,-7.62 -18.627,-7.197 -18.627,-3.81 ; -16.933,-3.81 -16.933,-7.197 -16.51,-7.62 -16.087,-7.197 -16.087,-3.81 ; -14.393,-3.81 -14.393,-7.197 -13.97,-7.62 -13.547,-7.197 -13.547,-3.81 ; -11.853,-3.81 -11.853,-7.197 -11.43,-7.62 -11.007,-7.197 -11.007,-3.81 ; -9.313,-3.81 -9.313,-7.197 -8.89,-7.62 -8.467,-7.197 -8.467,-3.81 ; -6.773,-3.81 -6.773,-7.197 -6.35,-7.62 -5.927,-7.197 -5.927,-3.81 ; -4.233,-3.81 -4.233,-7.197 -3.81,-7.62 -3.387,-7.197 -3.387,-3.81 ; -1.693,-3.81 -1.693,-7.197 -1.27,-7.62 -0.847,-7.197 -0.847,-3.81 ; 0.847,-3.81 0.847,-7.197 1.27,-7.62 1.693,-7.197 1.693,-3.81 ; 3.387,-3.81 3.387,-7.197 3.81,-7.62 4.233,-7.197 4.233,-3.81 ; 5.927,-3.81 5.927,-7.197 6.35,-7.62 6.773,-7.197 6.773,-3.81 ; 8.467,-3.81 8.467,-7.197 8.89,-7.62 9.313,-7.197 9.313,-3.81 ; 11.007,-3.81 11.007,-7.197 11.43,-7.62 11.853,-7.197 11.853,-3.81 ; 13.547,-3.81 13.547,-7.197 13.97,-7.62 14.393,-7.197 14.393,-3.81 ; 16.087,-3.81 16.087,-7.197 16.51,-7.62 16.933,-7.197 16.933,-3.81 ; 18.627,-3.81 18.627,-7.197 19.05,-7.62 19.473,-7.197 19.473,-3.81 ; -20.32,-2.54 -20.32,-3.81 20.32,-3.81 20.32,-2.54 ; -20.32,-2.54 20.32,-2.54 ; -20.32,-2.54 -20.32,2.54 20.32,2.54 20.32,-2.54
3D body "PLS-1R.step": height 5.45, standoff -3, extent -20.32,-8.62 -17.78,0
3D body "PLS-1Rr.stp": height 7.99, standoff -3, extent -20.32,-8.62 -17.78,2.54
3D body "PLS-1Rr.stp": height 7.99, standoff -3, extent -17.78,-8.62 -15.24,2.54
3D body "PLS-1R.step": height 5.45, standoff -3, extent -17.78,-8.62 -15.24,0
3D body "PLS-1R.step": height 5.45, standoff -3, extent -15.24,-8.62 -12.7,0
3D body "PLS-1Rr.stp": height 7.99, standoff -3, extent -15.24,-8.62 -12.7,2.54
3D body "PLS-1Rr.stp": height 7.99, standoff -3, extent -12.7,-8.62 -10.16,2.54
3D body "PLS-1R.step": height 5.45, standoff -3, extent -12.7,-8.62 -10.16,0
3D body "PLS-1R.step": height 5.45, standoff -3, extent -10.16,-8.62 -7.62,0
3D body "PLS-1Rr.stp": height 7.99, standoff -3, extent -10.16,-8.62 -7.62,2.54
3D body "PLS-1Rr.stp": height 7.99, standoff -3, extent -7.62,-8.62 -5.08,2.54
3D body "PLS-1R.step": height 5.45, standoff -3, extent -7.62,-8.62 -5.08,0
3D body "PLS-1R.step": height 5.45, standoff -3, extent -5.08,-8.62 -2.54,0
3D body "PLS-1Rr.stp": height 7.99, standoff -3, extent -5.08,-8.62 -2.54,2.54
3D body "PLS-1Rr.stp": height 7.99, standoff -3, extent -2.54,-8.62 0,2.54
3D body "PLS-1R.step": height 5.45, standoff -3, extent -2.54,-8.62 0,0
3D body "PLS-1R.step": height 5.45, standoff -3, extent 0,-8.62 2.54,0
3D body "PLS-1Rr.stp": height 7.99, standoff -3, extent 0,-8.62 2.54,2.54
3D body "PLS-1Rr.stp": height 7.99, standoff -3, extent 2.54,-8.62 5.08,2.54
3D body "PLS-1R.step": height 5.45, standoff -3, extent 2.54,-8.62 5.08,0
3D body "PLS-1R.step": height 5.45, standoff -3, extent 5.08,-8.62 7.62,0
3D body "PLS-1Rr.stp": height 7.99, standoff -3, extent 5.08,-8.62 7.62,2.54
3D body "PLS-1Rr.stp": height 7.99, standoff -3, extent 7.62,-8.62 10.16,2.54
3D body "PLS-1R.step": height 5.45, standoff -3, extent 7.62,-8.62 10.16,0
3D body "PLS-1R.step": height 5.45, standoff -3, extent 10.16,-8.62 12.7,0
3D body "PLS-1Rr.stp": height 7.99, standoff -3, extent 10.16,-8.62 12.7,2.54
3D body "PLS-1Rr.stp": height 7.99, standoff -3, extent 12.7,-8.62 15.24,2.54
3D body "PLS-1R.step": height 5.45, standoff -3, extent 12.7,-8.62 15.24,0
3D body "PLS-1R.step": height 5.45, standoff -3, extent 15.24,-8.62 17.78,0
3D body "PLS-1Rr.stp": height 7.99, standoff -3, extent 15.24,-8.62 17.78,2.54
3D body "PLS-1Rr.stp": height 7.99, standoff -3, extent 17.78,-8.62 20.32,2.54
3D body "PLS-1R.step": height 5.45, standoff -3, extent 17.78,-8.62 20.32,0

## HDRR_M_2X17 [mm] "Connector; Header; 17x2 Position"
height 7
pads (34):
  round 1.4 / inner round 1.4 / far side oval 1.4x2.2 hole 1: 1(-20.32,-1.27) 2(-20.32,1.27) 3(-17.78,-1.27) 4(-17.78,1.27) 5(-15.24,-1.27) 6(-15.24,1.27) 7(-12.7,-1.27) 8(-12.7,1.27) 9(-10.16,-1.27) 10(-10.16,1.27) 11(-7.62,-1.27) 12(-7.62,1.27) 13(-5.08,-1.27) 14(-5.08,1.27) 15(-2.54,-1.27) 16(-2.54,1.27) 17(0,-1.27) 18(0,1.27) 19(2.54,-1.27) 20(2.54,1.27) 21(5.08,-1.27) 22(5.08,1.27) 23(7.62,-1.27) 24(7.62,1.27) 25(10.16,-1.27) 26(10.16,1.27) 27(12.7,-1.27) 28(12.7,1.27) 29(15.24,-1.27) 30(15.24,1.27) 31(17.78,-1.27) 32(17.78,1.27) 33(20.32,-1.27) 34(20.32,1.27)
Top Overlay:
  lines w0.2: -20.743,-3.81 -20.743,-7.197 -20.32,-7.62 -19.897,-7.197 -19.897,-3.81 ; -18.203,-3.81 -18.203,-7.197 -17.78,-7.62 -17.357,-7.197 -17.357,-3.81 ; -15.663,-3.81 -15.663,-7.197 -15.24,-7.62 -14.817,-7.197 -14.817,-3.81 ; -13.123,-3.81 -13.123,-7.197 -12.7,-7.62 -12.277,-7.197 -12.277,-3.81 ; -10.583,-3.81 -10.583,-7.197 -10.16,-7.62 -9.737,-7.197 -9.737,-3.81 ; -8.043,-3.81 -8.043,-7.197 -7.62,-7.62 -7.197,-7.197 -7.197,-3.81 ; -5.503,-3.81 -5.503,-7.197 -5.08,-7.62 -4.657,-7.197 -4.657,-3.81 ; -2.963,-3.81 -2.963,-7.197 -2.54,-7.62 -2.117,-7.197 -2.117,-3.81 ; -0.423,-3.81 -0.423,-7.197 0,-7.62 0.423,-7.197 0.423,-3.81 ; 2.117,-3.81 2.117,-7.197 2.54,-7.62 2.963,-7.197 2.963,-3.81 ; 4.657,-3.81 4.657,-7.197 5.08,-7.62 5.503,-7.197 5.503,-3.81 ; 7.197,-3.81 7.197,-7.197 7.62,-7.62 8.043,-7.197 8.043,-3.81 ; 9.737,-3.81 9.737,-7.197 10.16,-7.62 10.583,-7.197 10.583,-3.81 ; 12.277,-3.81 12.277,-7.197 12.7,-7.62 13.123,-7.197 13.123,-3.81 ; 14.817,-3.81 14.817,-7.197 15.24,-7.62 15.663,-7.197 15.663,-3.81 ; 17.357,-3.81 17.357,-7.197 17.78,-7.62 18.203,-7.197 18.203,-3.81 ; 19.897,-3.81 19.897,-7.197 20.32,-7.62 20.743,-7.197 20.743,-3.81 ; -21.59,-2.54 -21.59,2.54 21.59,2.54 21.59,-2.54 ; -21.59,-2.54 21.59,-2.54 ; -21.59,-2.54 -21.59,-3.81 21.59,-3.81 21.59,-2.54
3D body "PLS-1R.step": height 5.45, standoff -3, extent 16.51,-8.62 19.05,0
3D body "PLS-1Rr.stp": height 7.99, standoff -3, extent 16.51,-8.62 19.05,2.54
3D body "PLS-1Rr.stp": height 7.99, standoff -3, extent 13.97,-8.62 16.51,2.54
3D body "PLS-1R.step": height 5.45, standoff -3, extent 13.97,-8.62 16.51,0
3D body "PLS-1R.step": height 5.45, standoff -3, extent 11.43,-8.62 13.97,0
3D body "PLS-1Rr.stp": height 7.99, standoff -3, extent 11.43,-8.62 13.97,2.54
3D body "PLS-1Rr.stp": height 7.99, standoff -3, extent 8.89,-8.62 11.43,2.54
3D body "PLS-1R.step": height 5.45, standoff -3, extent 8.89,-8.62 11.43,0
3D body "PLS-1R.step": height 5.45, standoff -3, extent 6.35,-8.62 8.89,0
3D body "PLS-1Rr.stp": height 7.99, standoff -3, extent 6.35,-8.62 8.89,2.54
3D body "PLS-1Rr.stp": height 7.99, standoff -3, extent 3.81,-8.62 6.35,2.54
3D body "PLS-1R.step": height 5.45, standoff -3, extent 3.81,-8.62 6.35,0
3D body "PLS-1R.step": height 5.45, standoff -3, extent 1.27,-8.62 3.81,0
3D body "PLS-1Rr.stp": height 7.99, standoff -3, extent 1.27,-8.62 3.81,2.54
3D body "PLS-1Rr.stp": height 7.99, standoff -3, extent -1.27,-8.62 1.27,2.54
3D body "PLS-1R.step": height 5.45, standoff -3, extent -1.27,-8.62 1.27,0
3D body "PLS-1R.step": height 5.45, standoff -3, extent -3.81,-8.62 -1.27,0
3D body "PLS-1Rr.stp": height 7.99, standoff -3, extent -3.81,-8.62 -1.27,2.54
3D body "PLS-1Rr.stp": height 7.99, standoff -3, extent -6.35,-8.62 -3.81,2.54
3D body "PLS-1R.step": height 5.45, standoff -3, extent -6.35,-8.62 -3.81,0
3D body "PLS-1R.step": height 5.45, standoff -3, extent -8.89,-8.62 -6.35,0
3D body "PLS-1Rr.stp": height 7.99, standoff -3, extent -8.89,-8.62 -6.35,2.54
3D body "PLS-1Rr.stp": height 7.99, standoff -3, extent -11.43,-8.62 -8.89,2.54
3D body "PLS-1R.step": height 5.45, standoff -3, extent -11.43,-8.62 -8.89,0
3D body "PLS-1R.step": height 5.45, standoff -3, extent -13.97,-8.62 -11.43,0
3D body "PLS-1Rr.stp": height 7.99, standoff -3, extent -13.97,-8.62 -11.43,2.54
3D body "PLS-1Rr.stp": height 7.99, standoff -3, extent -16.51,-8.62 -13.97,2.54
3D body "PLS-1R.step": height 5.45, standoff -3, extent -16.51,-8.62 -13.97,0
3D body "PLS-1R.step": height 5.45, standoff -3, extent -19.05,-8.62 -16.51,0
3D body "PLS-1Rr.stp": height 7.99, standoff -3, extent -19.05,-8.62 -16.51,2.54
3D body "PLS-1Rr.stp": height 7.99, standoff -3, extent -21.59,-8.62 -19.05,2.54
3D body "PLS-1R.step": height 5.45, standoff -3, extent -21.59,-8.62 -19.05,0
3D body "PLS-1R.step": height 5.45, standoff -3, extent 19.05,-8.62 21.59,0
3D body "PLS-1Rr.stp": height 7.99, standoff -3, extent 19.05,-8.62 21.59,2.54

## HDRR_M_2X18 [mm] "Connector; Header; 18x2 Position"
height 7
pads (36):
  round 1.4 / inner round 1.4 / far side oval 1.4x2.2 hole 1: 1(-21.59,-1.27) 2(-21.59,1.27) 3(-19.05,-1.27) 4(-19.05,1.27) 5(-16.51,-1.27) 6(-16.51,1.27) 7(-13.97,-1.27) 8(-13.97,1.27) 9(-11.43,-1.27) 10(-11.43,1.27) 11(-8.89,-1.27) 12(-8.89,1.27) 13(-6.35,-1.27) 14(-6.35,1.27) 15(-3.81,-1.27) 16(-3.81,1.27) 17(-1.27,-1.27) 18(-1.27,1.27) 19(1.27,-1.27) 20(1.27,1.27) 21(3.81,-1.27) 22(3.81,1.27) 23(6.35,-1.27) 24(6.35,1.27) 25(8.89,-1.27) 26(8.89,1.27) 27(11.43,-1.27) 28(11.43,1.27) 29(13.97,-1.27) 30(13.97,1.27) 31(16.51,-1.27) 32(16.51,1.27) 33(19.05,-1.27) 34(19.05,1.27) 35(21.59,-1.27) 36(21.59,1.27)
Top Overlay:
  lines w0.2: -22.013,-3.81 -22.013,-7.197 -21.59,-7.62 -21.167,-7.197 -21.167,-3.81 ; -19.473,-3.81 -19.473,-7.197 -19.05,-7.62 -18.627,-7.197 -18.627,-3.81 ; -16.933,-3.81 -16.933,-7.197 -16.51,-7.62 -16.087,-7.197 -16.087,-3.81 ; -14.393,-3.81 -14.393,-7.197 -13.97,-7.62 -13.547,-7.197 -13.547,-3.81 ; -11.853,-3.81 -11.853,-7.197 -11.43,-7.62 -11.007,-7.197 -11.007,-3.81 ; -9.313,-3.81 -9.313,-7.197 -8.89,-7.62 -8.467,-7.197 -8.467,-3.81 ; -6.773,-3.81 -6.773,-7.197 -6.35,-7.62 -5.927,-7.197 -5.927,-3.81 ; -4.233,-3.81 -4.233,-7.197 -3.81,-7.62 -3.387,-7.197 -3.387,-3.81 ; -1.693,-3.81 -1.693,-7.197 -1.27,-7.62 -0.847,-7.197 -0.847,-3.81 ; 0.847,-3.81 0.847,-7.197 1.27,-7.62 1.693,-7.197 1.693,-3.81 ; 3.387,-3.81 3.387,-7.197 3.81,-7.62 4.233,-7.197 4.233,-3.81 ; 5.927,-3.81 5.927,-7.197 6.35,-7.62 6.773,-7.197 6.773,-3.81 ; 8.467,-3.81 8.467,-7.197 8.89,-7.62 9.313,-7.197 9.313,-3.81 ; 11.007,-3.81 11.007,-7.197 11.43,-7.62 11.853,-7.197 11.853,-3.81 ; 13.547,-3.81 13.547,-7.197 13.97,-7.62 14.393,-7.197 14.393,-3.81 ; 16.087,-3.81 16.087,-7.197 16.51,-7.62 16.933,-7.197 16.933,-3.81 ; 18.627,-3.81 18.627,-7.197 19.05,-7.62 19.473,-7.197 19.473,-3.81 ; 21.167,-3.81 21.167,-7.197 21.59,-7.62 22.013,-7.197 22.013,-3.81 ; -22.86,-2.54 -22.86,-3.81 22.86,-3.81 22.86,-2.54 ; -22.86,-2.54 22.86,-2.54 ; -22.86,-2.54 -22.86,2.54 22.86,2.54 22.86,-2.54
3D body "PLS-1R.step": height 5.45, standoff -3, extent -22.86,-8.62 -20.32,0
3D body "PLS-1Rr.stp": height 7.99, standoff -3, extent -22.86,-8.62 -20.32,2.54
3D body "PLS-1Rr.stp": height 7.99, standoff -3, extent -20.32,-8.62 -17.78,2.54
3D body "PLS-1R.step": height 5.45, standoff -3, extent -20.32,-8.62 -17.78,0
3D body "PLS-1R.step": height 5.45, standoff -3, extent -17.78,-8.62 -15.24,0
3D body "PLS-1Rr.stp": height 7.99, standoff -3, extent -17.78,-8.62 -15.24,2.54
3D body "PLS-1Rr.stp": height 7.99, standoff -3, extent -15.24,-8.62 -12.7,2.54
3D body "PLS-1R.step": height 5.45, standoff -3, extent -15.24,-8.62 -12.7,0
3D body "PLS-1R.step": height 5.45, standoff -3, extent -12.7,-8.62 -10.16,0
3D body "PLS-1Rr.stp": height 7.99, standoff -3, extent -12.7,-8.62 -10.16,2.54
3D body "PLS-1Rr.stp": height 7.99, standoff -3, extent -10.16,-8.62 -7.62,2.54
3D body "PLS-1R.step": height 5.45, standoff -3, extent -10.16,-8.62 -7.62,0
3D body "PLS-1R.step": height 5.45, standoff -3, extent -7.62,-8.62 -5.08,0
3D body "PLS-1Rr.stp": height 7.99, standoff -3, extent -7.62,-8.62 -5.08,2.54
3D body "PLS-1Rr.stp": height 7.99, standoff -3, extent -5.08,-8.62 -2.54,2.54
3D body "PLS-1R.step": height 5.45, standoff -3, extent -5.08,-8.62 -2.54,0
3D body "PLS-1R.step": height 5.45, standoff -3, extent -2.54,-8.62 0,0
3D body "PLS-1Rr.stp": height 7.99, standoff -3, extent -2.54,-8.62 0,2.54
3D body "PLS-1Rr.stp": height 7.99, standoff -3, extent 0,-8.62 2.54,2.54
3D body "PLS-1R.step": height 5.45, standoff -3, extent 0,-8.62 2.54,0
3D body "PLS-1R.step": height 5.45, standoff -3, extent 2.54,-8.62 5.08,0
3D body "PLS-1Rr.stp": height 7.99, standoff -3, extent 2.54,-8.62 5.08,2.54
3D body "PLS-1Rr.stp": height 7.99, standoff -3, extent 5.08,-8.62 7.62,2.54
3D body "PLS-1R.step": height 5.45, standoff -3, extent 5.08,-8.62 7.62,0
3D body "PLS-1R.step": height 5.45, standoff -3, extent 7.62,-8.62 10.16,0
3D body "PLS-1Rr.stp": height 7.99, standoff -3, extent 7.62,-8.62 10.16,2.54
3D body "PLS-1Rr.stp": height 7.99, standoff -3, extent 10.16,-8.62 12.7,2.54
3D body "PLS-1R.step": height 5.45, standoff -3, extent 10.16,-8.62 12.7,0
3D body "PLS-1R.step": height 5.45, standoff -3, extent 12.7,-8.62 15.24,0
3D body "PLS-1Rr.stp": height 7.99, standoff -3, extent 12.7,-8.62 15.24,2.54
3D body "PLS-1Rr.stp": height 7.99, standoff -3, extent 15.24,-8.62 17.78,2.54
3D body "PLS-1R.step": height 5.45, standoff -3, extent 15.24,-8.62 17.78,0
3D body "PLS-1R.step": height 5.45, standoff -3, extent 17.78,-8.62 20.32,0
3D body "PLS-1Rr.stp": height 7.99, standoff -3, extent 17.78,-8.62 20.32,2.54
3D body "PLS-1Rr.stp": height 7.99, standoff -3, extent 20.32,-8.62 22.86,2.54
3D body "PLS-1R.step": height 5.45, standoff -3, extent 20.32,-8.62 22.86,0